# Altium footprint library Package_DFN_QFN.PcbLib: 735 footprints (part 36 of 46)
Each footprint in its own frame and in the unit in brackets; x right, y up, seen from the top. Pads: shape width x height; smd on the part's side, far side on the other; paste and mask are expansions set on the pad; w line width, h text height; cw(c..) or ccw(c..) is an arc to the next point about the centre after c.
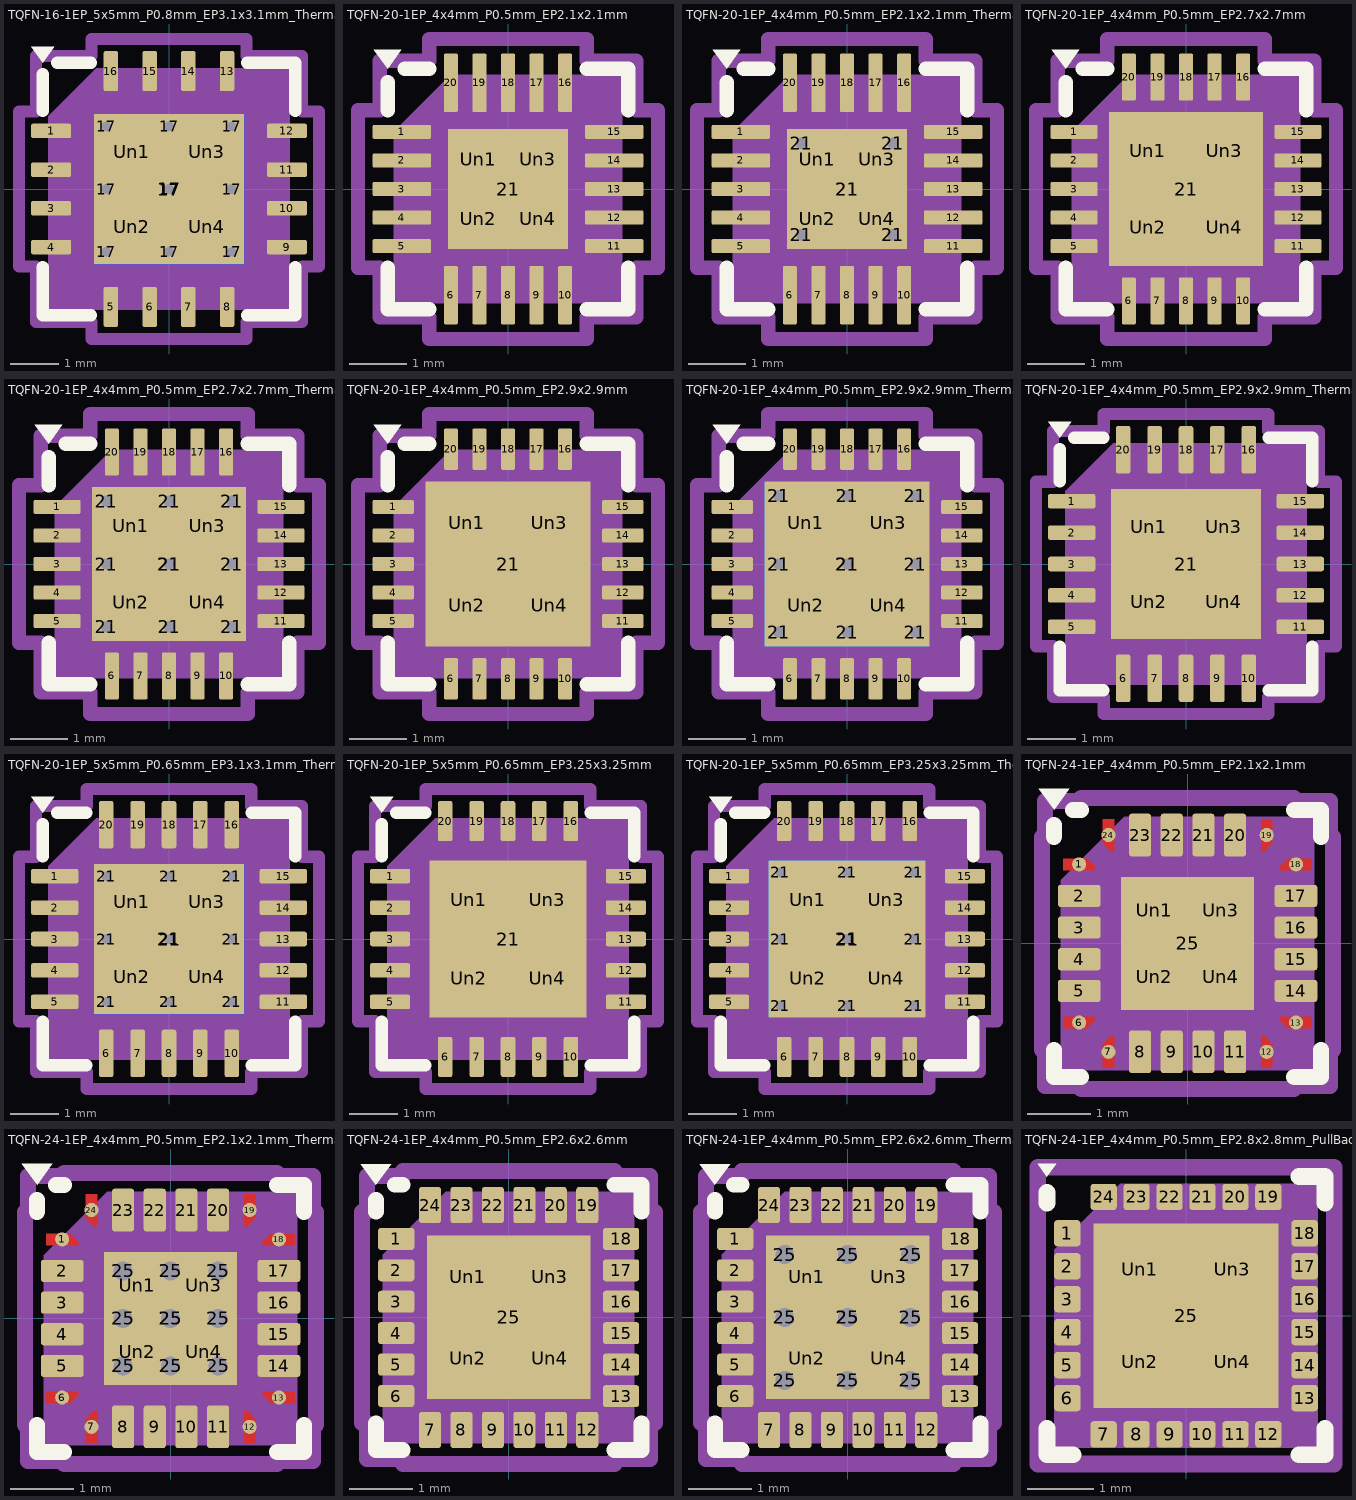
[diagram p35: the footprints below, top view; thin cyan lines are the x and y axes]

## TQFN-16-1EP_5x5mm_P0.8mm_EP3.1x3.1mm_ThermalVias [mm] "TQFN-16-1EP_5x5mm_P0.8mm_EP3.1x3.1mm_ThermalVias"
pads (31):
  rrect25% 0.825x0.3 smd: 1(-2.438,1.2) 2(-2.438,0.4) 3(-2.438,-0.4) 4(-2.438,-1.2) 9(2.438,-1.2) 10(2.438,-0.4) 11(2.438,0.4) 12(2.438,1.2)
  rrect25% 0.3x0.825 smd: 5(-1.2,-2.438) 6(-0.4,-2.438) 7(0.4,-2.438) 8(1.2,-2.438) 13(1.2,2.438) 14(0.4,2.438) 15(-0.4,2.438) 16(-1.2,2.438)
  round 0.5 hole 0.2: 17(-1.3,-1.3) 17(-1.3,0) 17(-1.3,1.3) 17(0,-1.3) 17(0,0) 17(0,1.3) 17(1.3,-1.3) 17(1.3,0) 17(1.3,1.3)
  rect 3.1x3.1 smd: 17(0,0)
  rect 3.1x3.1 smd far side: 17(0,0)
  rrect19% 1.34x1.34 on Top Paste: Un1(-0.775,0.775) Un2(-0.775,-0.775) Un3(0.775,0.775) Un4(0.775,-0.775)
F.SilkS:
  region: -2.61,2.61 -2.85,2.94 -2.37,2.94
  lines w0.254: -2.61,-1.61 -2.61,-2.61 -1.61,-2.61 ; -2.61,1.61 -2.61,2.37 ; -2.31,2.61 -1.61,2.61 ; 1.61,-2.61 2.61,-2.61 2.61,-1.61 ; 1.61,2.61 2.61,2.61 2.61,1.61
Top Component Center:
  lines w0.127: -0.127,0 0.127,0 -0.127,0 ; 0,-0.127 0,0.127 0,-0.127
Top Assembly:
  region: 2.5,-2.5 -2.5,-2.5 -2.5,1.5 -1.5,2.5 2.5,2.5
Top Courtyard:
  lines w0.254: -3.1,-1.6 -2.75,-1.6 -2.75,-2.75 -1.6,-2.75 -1.6,-3.1 1.6,-3.1 1.6,-2.75 2.75,-2.75 2.75,-1.6 3.1,-1.6 3.1,1.6 2.75,1.6 2.75,2.75 1.6,2.75 1.6,3.1 -1.6,3.1 -1.6,2.75 -2.75,2.75 -2.75,1.6 -3.1,1.6 -3.1,-1.6
Top Designator:
  text ".Designator" at -3.43,-0.344 h1.52

## TQFN-20-1EP_4x4mm_P0.5mm_EP2.1x2.1mm [mm] "TQFN-20-1EP_4x4mm_P0.5mm_EP2.1x2.1mm"
pads (25):
  rrect25% 1.025x0.25 smd: 1(-1.863,1) 2(-1.863,0.5) 3(-1.863,0) 4(-1.863,-0.5) 5(-1.863,-1) 11(1.863,-1) 12(1.863,-0.5) 13(1.863,0) 14(1.863,0.5) 15(1.863,1)
  rrect25% 0.25x1.025 smd: 6(-1,-1.863) 7(-0.5,-1.863) 8(0,-1.863) 9(0.5,-1.863) 10(1,-1.863) 16(1,1.863) 17(0.5,1.863) 18(0,1.863) 19(-0.5,1.863) 20(-1,1.863)
  rect 2.1x2.1 smd: 21(0,0)
  rrect25% 0.85x0.85 on Top Paste: Un1(-0.525,0.525) Un2(-0.525,-0.525) Un3(0.525,0.525) Un4(0.525,-0.525)
F.SilkS:
  region: -2.11,2.11 -2.35,2.44 -1.87,2.44
  lines w0.254: -2.11,-1.385 -2.11,-2.11 -1.385,-2.11 ; -2.11,1.385 -2.11,1.87 ; -1.81,2.11 -1.385,2.11 ; 1.385,-2.11 2.11,-2.11 2.11,-1.385 ; 1.385,2.11 2.11,2.11 2.11,1.385
Top Component Center:
  lines w0.127: -0.127,0 0.127,0 -0.127,0 ; 0,-0.127 0,0.127 0,-0.127
Top Assembly:
  region: 2,-2 -2,-2 -2,1 -1,2 2,2
Top Courtyard:
  lines w0.254: -2.63,-1.38 -2.25,-1.38 -2.25,-2.25 -1.38,-2.25 -1.38,-2.63 1.38,-2.63 1.38,-2.25 2.25,-2.25 2.25,-1.38 2.63,-1.38 2.63,1.38 2.25,1.38 2.25,2.25 1.38,2.25 1.38,2.63 -1.38,2.63 -1.38,2.25 -2.25,2.25 -2.25,1.38 -2.63,1.38 -2.63,-1.38
Top Designator:
  text ".Designator" at -3.43,-0.344 h1.52
3D body "TQFN-20-1EP_4x4mm_P0.5mm_EP2.7x2.7mm.step": height 0.8, standoff 0, extent -2,-2 2,2

## TQFN-20-1EP_4x4mm_P0.5mm_EP2.1x2.1mm_ThermalVias [mm] "TQFN-20-1EP_4x4mm_P0.5mm_EP2.1x2.1mm_ThermalVias"
pads (30):
  rrect25% 1.025x0.25 smd: 1(-1.863,1) 2(-1.863,0.5) 3(-1.863,0) 4(-1.863,-0.5) 5(-1.863,-1) 11(1.863,-1) 12(1.863,-0.5) 13(1.863,0) 14(1.863,0.5) 15(1.863,1)
  rrect25% 0.25x1.025 smd: 6(-1,-1.863) 7(-0.5,-1.863) 8(0,-1.863) 9(0.5,-1.863) 10(1,-1.863) 16(1,1.863) 17(0.5,1.863) 18(0,1.863) 19(-0.5,1.863) 20(-1,1.863)
  round 0.5 hole 0.2: 21(-0.8,-0.8) 21(-0.8,0.8) 21(0.8,-0.8) 21(0.8,0.8)
  rect 2.1x2.1 smd: 21(0,0)
  rect 2.1x2.1 smd far side: 21(0,0)
  rrect25% 0.91x0.91 on Top Paste: Un1(-0.525,0.525) Un2(-0.525,-0.525) Un3(0.525,0.525) Un4(0.525,-0.525)
F.SilkS:
  region: -2.11,2.11 -2.35,2.44 -1.87,2.44
  lines w0.254: -2.11,-1.385 -2.11,-2.11 -1.385,-2.11 ; -2.11,1.385 -2.11,1.87 ; -1.81,2.11 -1.385,2.11 ; 1.385,-2.11 2.11,-2.11 2.11,-1.385 ; 1.385,2.11 2.11,2.11 2.11,1.385
Top Component Center:
  lines w0.127: -0.127,0 0.127,0 -0.127,0 ; 0,-0.127 0,0.127 0,-0.127
Top Assembly:
  region: 2,-2 -2,-2 -2,1 -1,2 2,2
Top Courtyard:
  lines w0.254: -2.63,-1.38 -2.63,1.38 -2.25,1.38 -2.25,2.25 -1.38,2.25 -1.38,2.63 1.38,2.63 1.38,2.25 2.25,2.25 2.25,1.38 2.63,1.38 2.63,-1.38 2.25,-1.38 2.25,-2.25 1.38,-2.25 1.38,-2.63 -1.38,-2.63 -1.38,-2.25 -2.25,-2.25 -2.25,-1.38 -2.63,-1.38
Top Designator:
  text ".Designator" at -3.43,-0.344 h1.52
3D body "TQFN-20-1EP_4x4mm_P0.5mm_EP2.7x2.7mm.step": height 0.8, standoff 0, extent -2,-2 2,2

## TQFN-20-1EP_4x4mm_P0.5mm_EP2.7x2.7mm [mm] "TQFN-20-1EP_4x4mm_P0.5mm_EP2.7x2.7mm"
pads (25):
  rrect25% 0.825x0.25 smd: 1(-1.963,1) 2(-1.963,0.5) 3(-1.963,0) 4(-1.963,-0.5) 5(-1.963,-1) 11(1.963,-1) 12(1.963,-0.5) 13(1.963,0) 14(1.963,0.5) 15(1.963,1)
  rrect25% 0.25x0.825 smd: 6(-1,-1.963) 7(-0.5,-1.963) 8(0,-1.963) 9(0.5,-1.963) 10(1,-1.963) 16(1,1.963) 17(0.5,1.963) 18(0,1.963) 19(-0.5,1.963) 20(-1,1.963)
  rect 2.7x2.7 smd: 21(0,0)
  rrect23% 1.09x1.09 on Top Paste: Un1(-0.675,0.675) Un2(-0.675,-0.675) Un3(0.675,0.675) Un4(0.675,-0.675)
F.SilkS:
  region: -2.11,2.11 -2.35,2.44 -1.87,2.44
  lines w0.254: -2.11,-1.385 -2.11,-2.11 -1.385,-2.11 ; -2.11,1.385 -2.11,1.87 ; -1.81,2.11 -1.385,2.11 ; 1.385,-2.11 2.11,-2.11 2.11,-1.385 ; 1.385,2.11 2.11,2.11 2.11,1.385
Top Component Center:
  lines w0.127: -0.127,0 0.127,0 -0.127,0 ; 0,-0.127 0,0.127 0,-0.127
Top Assembly:
  region: 2,-2 -2,-2 -2,1 -1,2 2,2
Top Courtyard:
  lines w0.254: -2.63,-1.38 -2.63,1.38 -2.25,1.38 -2.25,2.25 -1.38,2.25 -1.38,2.63 1.38,2.63 1.38,2.25 2.25,2.25 2.25,1.38 2.63,1.38 2.63,-1.38 2.25,-1.38 2.25,-2.25 1.38,-2.25 1.38,-2.63 -1.38,-2.63 -1.38,-2.25 -2.25,-2.25 -2.25,-1.38 -2.63,-1.38
Top Designator:
  text ".Designator" at -3.43,-0.344 h1.52
3D body "TQFN-20-1EP_4x4mm_P0.5mm_EP2.7x2.7mm.step": height 0.8, standoff 0, extent -2,-2 2,2

## TQFN-20-1EP_4x4mm_P0.5mm_EP2.7x2.7mm_ThermalVias [mm] "TQFN-20-1EP_4x4mm_P0.5mm_EP2.7x2.7mm_ThermalVias"
pads (35):
  rrect25% 0.825x0.25 smd: 1(-1.963,1) 2(-1.963,0.5) 3(-1.963,0) 4(-1.963,-0.5) 5(-1.963,-1) 11(1.963,-1) 12(1.963,-0.5) 13(1.963,0) 14(1.963,0.5) 15(1.963,1)
  rrect25% 0.25x0.825 smd: 6(-1,-1.963) 7(-0.5,-1.963) 8(0,-1.963) 9(0.5,-1.963) 10(1,-1.963) 16(1,1.963) 17(0.5,1.963) 18(0,1.963) 19(-0.5,1.963) 20(-1,1.963)
  round 0.5 hole 0.2: 21(-1.1,-1.1) 21(-1.1,0) 21(-1.1,1.1) 21(0,-1.1) 21(0,0) 21(0,1.1) 21(1.1,-1.1) 21(1.1,0) 21(1.1,1.1)
  rect 2.7x2.7 smd: 21(0,0)
  rect 2.7x2.7 smd far side: 21(0,0)
  rrect21% 1.17x1.17 on Top Paste: Un1(-0.675,0.675) Un2(-0.675,-0.675) Un3(0.675,0.675) Un4(0.675,-0.675)
F.SilkS:
  region: -2.11,2.11 -2.35,2.44 -1.87,2.44
  lines w0.254: -2.11,-1.385 -2.11,-2.11 -1.385,-2.11 ; -2.11,1.385 -2.11,1.87 ; -1.81,2.11 -1.385,2.11 ; 1.385,-2.11 2.11,-2.11 2.11,-1.385 ; 1.385,2.11 2.11,2.11 2.11,1.385
Top Component Center:
  lines w0.127: -0.127,0 0.127,0 -0.127,0 ; 0,-0.127 0,0.127 0,-0.127
Top Assembly:
  region: 2,-2 -2,-2 -2,1 -1,2 2,2
Top Courtyard:
  lines w0.254: -2.63,-1.38 -2.25,-1.38 -2.25,-2.25 -1.38,-2.25 -1.38,-2.63 1.38,-2.63 1.38,-2.25 2.25,-2.25 2.25,-1.38 2.63,-1.38 2.63,1.38 2.25,1.38 2.25,2.25 1.38,2.25 1.38,2.63 -1.38,2.63 -1.38,2.25 -2.25,2.25 -2.25,1.38 -2.63,1.38 -2.63,-1.38
Top Designator:
  text ".Designator" at -3.43,-0.344 h1.52
3D body "TQFN-20-1EP_4x4mm_P0.5mm_EP2.7x2.7mm.step": height 0.8, standoff 0, extent -2,-2 2,2

## TQFN-20-1EP_4x4mm_P0.5mm_EP2.9x2.9mm [mm] "TQFN-20-1EP_4x4mm_P0.5mm_EP2.9x2.9mm"
pads (25):
  rrect25% 0.725x0.25 smd: 1(-2.013,1) 2(-2.013,0.5) 3(-2.013,0) 4(-2.013,-0.5) 5(-2.013,-1) 11(2.013,-1) 12(2.013,-0.5) 13(2.013,0) 14(2.013,0.5) 15(2.013,1)
  rrect25% 0.25x0.725 smd: 6(-1,-2.013) 7(-0.5,-2.013) 8(0,-2.013) 9(0.5,-2.013) 10(1,-2.013) 16(1,2.013) 17(0.5,2.013) 18(0,2.013) 19(-0.5,2.013) 20(-1,2.013)
  rect 2.9x2.9 smd: 21(0,0)
  rrect21% 1.17x1.17 on Top Paste: Un1(-0.725,0.725) Un2(-0.725,-0.725) Un3(0.725,0.725) Un4(0.725,-0.725)
F.SilkS:
  region: -2.11,2.11 -2.35,2.44 -1.87,2.44
  lines w0.254: -2.11,-1.385 -2.11,-2.11 -1.385,-2.11 ; -2.11,1.385 -2.11,1.87 ; -1.81,2.11 -1.385,2.11 ; 1.385,-2.11 2.11,-2.11 2.11,-1.385 ; 1.385,2.11 2.11,2.11 2.11,1.385
Top Component Center:
  lines w0.127: -0.127,0 0.127,0 -0.127,0 ; 0,-0.127 0,0.127 0,-0.127
Top Assembly:
  region: 2,-2 -2,-2 -2,1 -1,2 2,2
Top Courtyard:
  lines w0.254: -2.63,-1.38 -2.63,1.38 -2.25,1.38 -2.25,2.25 -1.38,2.25 -1.38,2.63 1.38,2.63 1.38,2.25 2.25,2.25 2.25,1.38 2.63,1.38 2.63,-1.38 2.25,-1.38 2.25,-2.25 1.38,-2.25 1.38,-2.63 -1.38,-2.63 -1.38,-2.25 -2.25,-2.25 -2.25,-1.38 -2.63,-1.38
Top Designator:
  text ".Designator" at -3.43,-0.344 h1.52
3D body "TQFN-20-1EP_4x4mm_P0.5mm_EP2.7x2.7mm.step": height 0.8, standoff 0, extent -2,-2 2,2

## TQFN-20-1EP_4x4mm_P0.5mm_EP2.9x2.9mm_ThermalVias [mm] "TQFN-20-1EP_4x4mm_P0.5mm_EP2.9x2.9mm_ThermalVias"
pads (35):
  rrect25% 0.725x0.25 smd: 1(-2.013,1) 2(-2.013,0.5) 3(-2.013,0) 4(-2.013,-0.5) 5(-2.013,-1) 11(2.013,-1) 12(2.013,-0.5) 13(2.013,0) 14(2.013,0.5) 15(2.013,1)
  rrect25% 0.25x0.725 smd: 6(-1,-2.013) 7(-0.5,-2.013) 8(0,-2.013) 9(0.5,-2.013) 10(1,-2.013) 16(1,2.013) 17(0.5,2.013) 18(0,2.013) 19(-0.5,2.013) 20(-1,2.013)
  round 0.5 hole 0.2: 21(-1.2,-1.2) 21(-1.2,0) 21(-1.2,1.2) 21(0,-1.2) 21(0,0) 21(0,1.2) 21(1.2,-1.2) 21(1.2,0) 21(1.2,1.2)
  rect 2.9x2.9 smd: 21(0,0)
  rect 2.9x2.9 smd far side: 21(0,0)
  rrect20% 1.26x1.26 on Top Paste: Un1(-0.725,0.725) Un2(-0.725,-0.725) Un3(0.725,0.725) Un4(0.725,-0.725)
F.SilkS:
  region: -2.11,2.11 -2.35,2.44 -1.87,2.44
  lines w0.254: -2.11,-1.385 -2.11,-2.11 -1.385,-2.11 ; -2.11,1.385 -2.11,1.87 ; -1.81,2.11 -1.385,2.11 ; 1.385,-2.11 2.11,-2.11 2.11,-1.385 ; 1.385,2.11 2.11,2.11 2.11,1.385
Top Component Center:
  lines w0.127: -0.127,0 0.127,0 -0.127,0 ; 0,-0.127 0,0.127 0,-0.127
Top Assembly:
  region: 2,-2 -2,-2 -2,1 -1,2 2,2
Top Courtyard:
  lines w0.254: -2.63,-1.38 -2.25,-1.38 -2.25,-2.25 -1.38,-2.25 -1.38,-2.63 1.38,-2.63 1.38,-2.25 2.25,-2.25 2.25,-1.38 2.63,-1.38 2.63,1.38 2.25,1.38 2.25,2.25 1.38,2.25 1.38,2.63 -1.38,2.63 -1.38,2.25 -2.25,2.25 -2.25,1.38 -2.63,1.38 -2.63,-1.38
Top Designator:
  text ".Designator" at -3.43,-0.344 h1.52
3D body "TQFN-20-1EP_4x4mm_P0.5mm_EP2.7x2.7mm.step": height 0.8, standoff 0, extent -2,-2 2,2

## TQFN-20-1EP_4x4mm_P0.5mm_EP2.9x2.9mm_ThermalVias - duplicate [mm] "TQFN-20-1EP_4x4mm_P0.5mm_EP2.9x2.9mm_ThermalVias"
pads (25):
  rrect25% 0.975x0.3 smd: 1(-2.362,1.3) 2(-2.362,0.65) 3(-2.362,0) 4(-2.362,-0.65) 5(-2.362,-1.3) 11(2.362,-1.3) 12(2.362,-0.65) 13(2.362,0) 14(2.362,0.65) 15(2.362,1.3)
  rrect25% 0.3x0.975 smd: 6(-1.3,-2.362) 7(-0.65,-2.362) 8(0,-2.362) 9(0.65,-2.362) 10(1.3,-2.362) 16(1.3,2.362) 17(0.65,2.362) 18(0,2.362) 19(-0.65,2.362) 20(-1.3,2.362)
  rect 3.1x3.1 smd: 21(0,0)
  rrect20% 1.25x1.25 on Top Paste: Un1(-0.775,0.775) Un2(-0.775,-0.775) Un3(0.775,0.775) Un4(0.775,-0.775)
F.SilkS:
  region: -2.61,2.61 -2.85,2.94 -2.37,2.94
  lines w0.254: -2.61,-1.71 -2.61,-2.61 -1.71,-2.61 ; -2.61,1.71 -2.61,2.37 ; -2.31,2.61 -1.71,2.61 ; 1.71,-2.61 2.61,-2.61 2.61,-1.71 ; 1.71,2.61 2.61,2.61 2.61,1.71
Top Component Center:
  lines w0.127: -0.127,0 0.127,0 -0.127,0 ; 0,-0.127 0,0.127 0,-0.127
Top Assembly:
  region: 2.5,-2.5 -2.5,-2.5 -2.5,1.5 -1.5,2.5 2.5,2.5
Top Courtyard:
  lines w0.254: -3.1,-1.7 -3.1,1.7 -2.75,1.7 -2.75,2.75 -1.7,2.75 -1.7,3.1 1.7,3.1 1.7,2.75 2.75,2.75 2.75,1.7 3.1,1.7 3.1,-1.7 2.75,-1.7 2.75,-2.75 1.7,-2.75 1.7,-3.1 -1.7,-3.1 -1.7,-2.75 -2.75,-2.75 -2.75,-1.7 -3.1,-1.7
Top Designator:
  text ".Designator" at -3.43,-0.344 h1.52
3D body "TQFN-20-1EP_4x4mm_P0.5mm_EP2.7x2.7mm.step": height 0.8, standoff 0, extent -2,-2 2,2

## TQFN-20-1EP_5x5mm_P0.65mm_EP3.1x3.1mm_ThermalVias [mm] "TQFN-20-1EP_5x5mm_P0.65mm_EP3.1x3.1mm_ThermalVias"
pads (35):
  rrect25% 0.975x0.3 smd: 1(-2.362,1.3) 2(-2.362,0.65) 3(-2.362,0) 4(-2.362,-0.65) 5(-2.362,-1.3) 11(2.362,-1.3) 12(2.362,-0.65) 13(2.362,0) 14(2.362,0.65) 15(2.362,1.3)
  rrect25% 0.3x0.975 smd: 6(-1.3,-2.362) 7(-0.65,-2.362) 8(0,-2.362) 9(0.65,-2.362) 10(1.3,-2.362) 16(1.3,2.362) 17(0.65,2.362) 18(0,2.362) 19(-0.65,2.362) 20(-1.3,2.362)
  round 0.5 hole 0.2: 21(-1.3,-1.3) 21(-1.3,0) 21(-1.3,1.3) 21(0,-1.3) 21(0,0) 21(0,1.3) 21(1.3,-1.3) 21(1.3,0) 21(1.3,1.3)
  rect 3.1x3.1 smd: 21(0,0)
  rect 3.1x3.1 smd far side: 21(0,0)
  rrect19% 1.34x1.34 on Top Paste: Un1(-0.775,0.775) Un2(-0.775,-0.775) Un3(0.775,0.775) Un4(0.775,-0.775)
F.SilkS:
  region: -2.61,2.61 -2.85,2.94 -2.37,2.94
  lines w0.254: -2.61,-1.71 -2.61,-2.61 -1.71,-2.61 ; -2.61,1.71 -2.61,2.37 ; -2.31,2.61 -1.71,2.61 ; 1.71,-2.61 2.61,-2.61 2.61,-1.71 ; 1.71,2.61 2.61,2.61 2.61,1.71
Top Component Center:
  lines w0.127: -0.127,0 0.127,0 -0.127,0 ; 0,-0.127 0,0.127 0,-0.127
Top Assembly:
  region: 2.5,-2.5 -2.5,-2.5 -2.5,1.5 -1.5,2.5 2.5,2.5
Top Courtyard:
  lines w0.254: -3.1,-1.7 -3.1,1.7 -2.75,1.7 -2.75,2.75 -1.7,2.75 -1.7,3.1 1.7,3.1 1.7,2.75 2.75,2.75 2.75,1.7 3.1,1.7 3.1,-1.7 2.75,-1.7 2.75,-2.75 1.7,-2.75 1.7,-3.1 -1.7,-3.1 -1.7,-2.75 -2.75,-2.75 -2.75,-1.7 -3.1,-1.7
Top Designator:
  text ".Designator" at -3.43,-0.344 h1.52
3D body "TQFN-20-1EP_5x5mm_P0.65mm_EP3.1x3.1mm.step": height 0.77, standoff 0, extent -2.5,-2.5 2.5,2.5

## TQFN-20-1EP_5x5mm_P0.65mm_EP3.25x3.25mm [mm] "TQFN-20-1EP_5x5mm_P0.65mm_EP3.25x3.25mm"
pads (25):
  rrect25% 0.825x0.3 smd: 1(-2.438,1.3) 2(-2.438,0.65) 3(-2.438,0) 4(-2.438,-0.65) 5(-2.438,-1.3) 11(2.438,-1.3) 12(2.438,-0.65) 13(2.438,0) 14(2.438,0.65) 15(2.438,1.3)
  rrect25% 0.3x0.825 smd: 6(-1.3,-2.438) 7(-0.65,-2.438) 8(0,-2.438) 9(0.65,-2.438) 10(1.3,-2.438) 16(1.3,2.438) 17(0.65,2.438) 18(0,2.438) 19(-0.65,2.438) 20(-1.3,2.438)
  rect 3.25x3.25 smd: 21(0,0)
  rrect19% 1.31x1.31 on Top Paste: Un1(-0.81,0.81) Un2(-0.81,-0.81) Un3(0.81,0.81) Un4(0.81,-0.81)
F.SilkS:
  region: -2.61,2.61 -2.85,2.94 -2.37,2.94
  lines w0.254: -2.61,-1.71 -2.61,-2.61 -1.71,-2.61 ; -2.61,1.71 -2.61,2.37 ; -2.31,2.61 -1.71,2.61 ; 1.71,-2.61 2.61,-2.61 2.61,-1.71 ; 1.71,2.61 2.61,2.61 2.61,1.71
Top Component Center:
  lines w0.127: -0.127,0 0.127,0 -0.127,0 ; 0,-0.127 0,0.127 0,-0.127
Top Assembly:
  region: 2.5,-2.5 -2.5,-2.5 -2.5,1.5 -1.5,2.5 2.5,2.5
Top Courtyard:
  lines w0.254: -3.1,-1.7 -2.75,-1.7 -2.75,-2.75 -1.7,-2.75 -1.7,-3.1 1.7,-3.1 1.7,-2.75 2.75,-2.75 2.75,-1.7 3.1,-1.7 3.1,1.7 2.75,1.7 2.75,2.75 1.7,2.75 1.7,3.1 -1.7,3.1 -1.7,2.75 -2.75,2.75 -2.75,1.7 -3.1,1.7 -3.1,-1.7
Top Designator:
  text ".Designator" at -3.43,-0.344 h1.52
3D body "TQFN-20-1EP_5x5mm_P0.65mm_EP3.1x3.1mm.step": height 0.77, standoff 0, extent -2.5,-2.5 2.5,2.5

## TQFN-20-1EP_5x5mm_P0.65mm_EP3.25x3.25mm_ThermalVias [mm] "TQFN-20-1EP_5x5mm_P0.65mm_EP3.25x3.25mm_ThermalVias"
pads (35):
  rrect25% 0.825x0.3 smd: 1(-2.438,1.3) 2(-2.438,0.65) 3(-2.438,0) 4(-2.438,-0.65) 5(-2.438,-1.3) 11(2.438,-1.3) 12(2.438,-0.65) 13(2.438,0) 14(2.438,0.65) 15(2.438,1.3)
  rrect25% 0.3x0.825 smd: 6(-1.3,-2.438) 7(-0.65,-2.438) 8(0,-2.438) 9(0.65,-2.438) 10(1.3,-2.438) 16(1.3,2.438) 17(0.65,2.438) 18(0,2.438) 19(-0.65,2.438) 20(-1.3,2.438)
  round 0.5 hole 0.2: 21(-1.375,-1.375) 21(-1.375,0) 21(-1.375,1.375) 21(0,-1.375) 21(0,0) 21(0,1.375) 21(1.375,-1.375) 21(1.375,0) 21(1.375,1.375)
  rect 3.25x3.25 smd: 21(0,0)
  rect 3.25x3.25 smd far side: 21(0,0)
  rrect18% 1.41x1.41 on Top Paste: Un1(-0.81,0.81) Un2(-0.81,-0.81) Un3(0.81,0.81) Un4(0.81,-0.81)
F.SilkS:
  region: -2.61,2.61 -2.85,2.94 -2.37,2.94
  lines w0.254: -2.61,-1.71 -2.61,-2.61 -1.71,-2.61 ; -2.61,1.71 -2.61,2.37 ; -2.31,2.61 -1.71,2.61 ; 1.71,-2.61 2.61,-2.61 2.61,-1.71 ; 1.71,2.61 2.61,2.61 2.61,1.71
Top Component Center:
  lines w0.127: -0.127,0 0.127,0 -0.127,0 ; 0,-0.127 0,0.127 0,-0.127
Top Assembly:
  region: 2.5,-2.5 -2.5,-2.5 -2.5,1.5 -1.5,2.5 2.5,2.5
Top Courtyard:
  lines w0.254: -3.1,-1.7 -2.75,-1.7 -2.75,-2.75 -1.7,-2.75 -1.7,-3.1 1.7,-3.1 1.7,-2.75 2.75,-2.75 2.75,-1.7 3.1,-1.7 3.1,1.7 2.75,1.7 2.75,2.75 1.7,2.75 1.7,3.1 -1.7,3.1 -1.7,2.75 -2.75,2.75 -2.75,1.7 -3.1,1.7 -3.1,-1.7
Top Designator:
  text ".Designator" at -3.43,-0.344 h1.52
3D body "TQFN-20-1EP_5x5mm_P0.65mm_EP3.1x3.1mm.step": height 0.77, standoff 0, extent -2.5,-2.5 2.5,2.5

## TQFN-24-1EP_4x4mm_P0.5mm_EP2.1x2.1mm [mm] "TQFN-24-1EP_4x4mm_P0.5mm_EP2.1x2.1mm"
pads (29):
  round 0.223 smd: 1(-1.713,1.25) 6(-1.713,-1.25) 7(-1.25,-1.713) 12(1.25,-1.713) 13(1.713,-1.25) 18(1.713,1.25) 19(1.25,1.713) 24(-1.25,1.713)
  rrect25% 0.675x0.35 smd: 2(-1.713,0.75) 3(-1.713,0.25) 4(-1.713,-0.25) 5(-1.713,-0.75) 14(1.713,-0.75) 15(1.713,-0.25) 16(1.713,0.25) 17(1.713,0.75)
  rrect25% 0.35x0.675 smd: 8(-0.75,-1.713) 9(-0.25,-1.713) 10(0.25,-1.713) 11(0.75,-1.713) 20(0.75,1.713) 21(0.25,1.713) 22(-0.25,1.713) 23(-0.75,1.713)
  rect 2.1x2.1 smd: 25(0,0)
  rrect25% 0.85x0.85 on Top Paste: Un1(-0.525,0.525) Un2(-0.525,-0.525) Un3(0.525,0.525) Un4(0.525,-0.525)
F.Cu:
  region: -1.16,1.46 -1.21,1.46 -1.34,1.59 -1.34,1.965 -1.16,1.965
  region: 1.34,1.59 1.21,1.46 1.16,1.46 1.16,1.965 1.34,1.965
  region: 1.965,1.16 1.46,1.16 1.46,1.21 1.59,1.34 1.965,1.34
  region: 1.965,-1.34 1.59,-1.34 1.46,-1.21 1.46,-1.16 1.965,-1.16
  region: 1.34,-1.59 1.34,-1.965 1.16,-1.965 1.16,-1.46 1.21,-1.46
  region: -1.16,-1.965 -1.34,-1.965 -1.34,-1.59 -1.21,-1.46 -1.16,-1.46
  region: -1.46,-1.21 -1.59,-1.34 -1.965,-1.34 -1.965,-1.16 -1.46,-1.16
  region: -1.46,1.21 -1.46,1.16 -1.965,1.16 -1.965,1.34 -1.59,1.34
F.SilkS:
  region: -2.11,2.11 -2.35,2.44 -1.87,2.44
  lines w0.254: -2.11,-1.685 -2.11,-2.11 -1.685,-2.11 ; -2.11,1.685 -2.11,1.87 ; -1.81,2.11 -1.685,2.11 ; 1.685,-2.11 2.11,-2.11 2.11,-1.685 ; 1.685,2.11 2.11,2.11 2.11,1.685
F.Paste:
  region: -1.16,1.46 -1.21,1.46 -1.34,1.59 -1.34,1.965 -1.16,1.965
  region: 1.34,1.59 1.21,1.46 1.16,1.46 1.16,1.965 1.34,1.965
  region: 1.965,1.16 1.46,1.16 1.46,1.21 1.59,1.34 1.965,1.34
  region: 1.965,-1.34 1.59,-1.34 1.46,-1.21 1.46,-1.16 1.965,-1.16
  region: 1.34,-1.59 1.34,-1.965 1.16,-1.965 1.16,-1.46 1.21,-1.46
  region: -1.16,-1.965 -1.34,-1.965 -1.34,-1.59 -1.21,-1.46 -1.16,-1.46
  region: -1.46,-1.21 -1.59,-1.34 -1.965,-1.34 -1.965,-1.16 -1.46,-1.16
  region: -1.46,1.21 -1.46,1.16 -1.965,1.16 -1.965,1.34 -1.59,1.34
F.Mask:
  region: -1.16,1.46 -1.21,1.46 -1.34,1.59 -1.34,1.965 -1.16,1.965
  region: 1.34,1.59 1.21,1.46 1.16,1.46 1.16,1.965 1.34,1.965
  region: 1.965,1.16 1.46,1.16 1.46,1.21 1.59,1.34 1.965,1.34
  region: 1.965,-1.34 1.59,-1.34 1.46,-1.21 1.46,-1.16 1.965,-1.16
  region: 1.34,-1.59 1.34,-1.965 1.16,-1.965 1.16,-1.46 1.21,-1.46
  region: -1.16,-1.965 -1.34,-1.965 -1.34,-1.59 -1.21,-1.46 -1.16,-1.46
  region: -1.46,-1.21 -1.59,-1.34 -1.965,-1.34 -1.965,-1.16 -1.46,-1.16
  region: -1.46,1.21 -1.46,1.16 -1.965,1.16 -1.965,1.34 -1.59,1.34
Top Component Center:
  lines w0.127: -0.127,0 0.127,0 -0.127,0 ; 0,-0.127 0,0.127 0,-0.127
Top Assembly:
  region: 2,-2 -2,-2 -2,1 -1,2 2,2
Top Courtyard:
  lines w0.254: -2.3,-1.68 -2.25,-1.68 -2.25,-2.25 -1.68,-2.25 -1.68,-2.3 1.68,-2.3 1.68,-2.25 2.25,-2.25 2.25,-1.68 2.3,-1.68 2.3,1.68 2.25,1.68 2.25,2.25 1.68,2.25 1.68,2.3 -1.68,2.3 -1.68,2.25 -2.25,2.25 -2.25,1.68 -2.3,1.68 -2.3,-1.68
Top Designator:
  text ".Designator" at -3.43,-0.344 h1.52

## TQFN-24-1EP_4x4mm_P0.5mm_EP2.1x2.1mm_ThermalVias [mm] "TQFN-24-1EP_4x4mm_P0.5mm_EP2.1x2.1mm_ThermalVias"
pads (39):
  round 0.223 smd: 1(-1.713,1.25) 6(-1.713,-1.25) 7(-1.25,-1.713) 12(1.25,-1.713) 13(1.713,-1.25) 18(1.713,1.25) 19(1.25,1.713) 24(-1.25,1.713)
  rrect25% 0.675x0.35 smd: 2(-1.713,0.75) 3(-1.713,0.25) 4(-1.713,-0.25) 5(-1.713,-0.75) 14(1.713,-0.75) 15(1.713,-0.25) 16(1.713,0.25) 17(1.713,0.75)
  rrect25% 0.35x0.675 smd: 8(-0.75,-1.713) 9(-0.25,-1.713) 10(0.25,-1.713) 11(0.75,-1.713) 20(0.75,1.713) 21(0.25,1.713) 22(-0.25,1.713) 23(-0.75,1.713)
  round 0.6 hole 0.3: 25(-0.75,-0.75) 25(-0.75,0) 25(-0.75,0.75) 25(0,-0.75) 25(0,0) 25(0,0.75) 25(0.75,-0.75) 25(0.75,0) 25(0.75,0.75)
  rect 2.1x2.1 smd: 25(0,0)
  rect 2.1x2.1 smd far side: 25(0,0)
  rrect25% 0.85x0.85 on Top Paste: Un1(-0.525,0.525) Un2(-0.525,-0.525) Un3(0.525,0.525) Un4(0.525,-0.525)
F.Cu:
  region: -1.16,1.46 -1.21,1.46 -1.34,1.59 -1.34,1.965 -1.16,1.965
  region: 1.34,1.59 1.21,1.46 1.16,1.46 1.16,1.965 1.34,1.965
  region: 1.965,1.16 1.46,1.16 1.46,1.21 1.59,1.34 1.965,1.34
  region: 1.965,-1.34 1.59,-1.34 1.46,-1.21 1.46,-1.16 1.965,-1.16
  region: 1.34,-1.59 1.34,-1.965 1.16,-1.965 1.16,-1.46 1.21,-1.46
  region: -1.16,-1.965 -1.34,-1.965 -1.34,-1.59 -1.21,-1.46 -1.16,-1.46
  region: -1.46,-1.21 -1.59,-1.34 -1.965,-1.34 -1.965,-1.16 -1.46,-1.16
  region: -1.46,1.21 -1.46,1.16 -1.965,1.16 -1.965,1.34 -1.59,1.34
F.SilkS:
  region: -2.11,2.11 -2.35,2.44 -1.87,2.44
  lines w0.254: -2.11,-1.685 -2.11,-2.11 -1.685,-2.11 ; -2.11,1.685 -2.11,1.87 ; -1.81,2.11 -1.685,2.11 ; 1.685,-2.11 2.11,-2.11 2.11,-1.685 ; 1.685,2.11 2.11,2.11 2.11,1.685
F.Paste:
  region: -1.16,1.46 -1.21,1.46 -1.34,1.59 -1.34,1.965 -1.16,1.965
  region: 1.34,1.59 1.21,1.46 1.16,1.46 1.16,1.965 1.34,1.965
  region: 1.965,1.16 1.46,1.16 1.46,1.21 1.59,1.34 1.965,1.34
  region: 1.965,-1.34 1.59,-1.34 1.46,-1.21 1.46,-1.16 1.965,-1.16
  region: 1.34,-1.59 1.34,-1.965 1.16,-1.965 1.16,-1.46 1.21,-1.46
  region: -1.16,-1.965 -1.34,-1.965 -1.34,-1.59 -1.21,-1.46 -1.16,-1.46
  region: -1.46,-1.21 -1.59,-1.34 -1.965,-1.34 -1.965,-1.16 -1.46,-1.16
  region: -1.46,1.21 -1.46,1.16 -1.965,1.16 -1.965,1.34 -1.59,1.34
F.Mask:
  region: -1.16,1.46 -1.21,1.46 -1.34,1.59 -1.34,1.965 -1.16,1.965
  region: 1.34,1.59 1.21,1.46 1.16,1.46 1.16,1.965 1.34,1.965
  region: 1.965,1.16 1.46,1.16 1.46,1.21 1.59,1.34 1.965,1.34
  region: 1.965,-1.34 1.59,-1.34 1.46,-1.21 1.46,-1.16 1.965,-1.16
  region: 1.34,-1.59 1.34,-1.965 1.16,-1.965 1.16,-1.46 1.21,-1.46
  region: -1.16,-1.965 -1.34,-1.965 -1.34,-1.59 -1.21,-1.46 -1.16,-1.46
  region: -1.46,-1.21 -1.59,-1.34 -1.965,-1.34 -1.965,-1.16 -1.46,-1.16
  region: -1.46,1.21 -1.46,1.16 -1.965,1.16 -1.965,1.34 -1.59,1.34
Top Component Center:
  lines w0.127: -0.127,0 0.127,0 -0.127,0 ; 0,-0.127 0,0.127 0,-0.127
Top Assembly:
  region: 2,-2 -2,-2 -2,1 -1,2 2,2
Top Courtyard:
  lines w0.254: -2.3,-1.68 -2.25,-1.68 -2.25,-2.25 -1.68,-2.25 -1.68,-2.3 1.68,-2.3 1.68,-2.25 2.25,-2.25 2.25,-1.68 2.3,-1.68 2.3,1.68 2.25,1.68 2.25,2.25 1.68,2.25 1.68,2.3 -1.68,2.3 -1.68,2.25 -2.25,2.25 -2.25,1.68 -2.3,1.68 -2.3,-1.68
Top Designator:
  text ".Designator" at -3.43,-0.344 h1.52

## TQFN-24-1EP_4x4mm_P0.5mm_EP2.6x2.6mm [mm] "TQFN-24-1EP_4x4mm_P0.5mm_EP2.6x2.6mm"
pads (29):
  rrect25% 0.575x0.35 smd: 1(-1.787,1.25) 2(-1.787,0.75) 3(-1.787,0.25) 4(-1.787,-0.25) 5(-1.787,-0.75) 6(-1.787,-1.25) 13(1.787,-1.25) 14(1.787,-0.75) 15(1.787,-0.25) 16(1.787,0.25) 17(1.787,0.75) 18(1.787,1.25)
  rrect25% 0.35x0.575 smd: 7(-1.25,-1.787) 8(-0.75,-1.787) 9(-0.25,-1.787) 10(0.25,-1.787) 11(0.75,-1.787) 12(1.25,-1.787) 19(1.25,1.787) 20(0.75,1.787) 21(0.25,1.787) 22(-0.25,1.787) 23(-0.75,1.787) 24(-1.25,1.787)
  rect 2.6x2.6 smd: 25(0,0)
  rrect24% 1.05x1.05 on Top Paste: Un1(-0.65,0.65) Un2(-0.65,-0.65) Un3(0.65,0.65) Un4(0.65,-0.65)
F.SilkS:
  region: -2.11,2.11 -2.35,2.44 -1.87,2.44
  lines w0.254: -2.11,-1.685 -2.11,-2.11 -1.685,-2.11 ; -2.11,1.685 -2.11,1.87 ; -1.81,2.11 -1.685,2.11 ; 1.685,-2.11 2.11,-2.11 2.11,-1.685 ; 1.685,2.11 2.11,2.11 2.11,1.685
Top Component Center:
  lines w0.127: -0.127,0 0.127,0 -0.127,0 ; 0,-0.127 0,0.127 0,-0.127
Top Assembly:
  region: 2,-2 -2,-2 -2,1 -1,2 2,2
Top Courtyard:
  lines w0.254: -2.33,-1.68 -2.25,-1.68 -2.25,-2.25 -1.68,-2.25 -1.68,-2.33 1.68,-2.33 1.68,-2.25 2.25,-2.25 2.25,-1.68 2.33,-1.68 2.33,1.68 2.25,1.68 2.25,2.25 1.68,2.25 1.68,2.33 -1.68,2.33 -1.68,2.25 -2.25,2.25 -2.25,1.68 -2.33,1.68 -2.33,-1.68
Top Designator:
  text ".Designator" at -3.43,-0.344 h1.52

## TQFN-24-1EP_4x4mm_P0.5mm_EP2.6x2.6mm_ThermalVias [mm] "TQFN-24-1EP_4x4mm_P0.5mm_EP2.6x2.6mm_ThermalVias"
pads (39):
  rrect25% 0.575x0.35 smd: 1(-1.787,1.25) 2(-1.787,0.75) 3(-1.787,0.25) 4(-1.787,-0.25) 5(-1.787,-0.75) 6(-1.787,-1.25) 13(1.787,-1.25) 14(1.787,-0.75) 15(1.787,-0.25) 16(1.787,0.25) 17(1.787,0.75) 18(1.787,1.25)
  rrect25% 0.35x0.575 smd: 7(-1.25,-1.787) 8(-0.75,-1.787) 9(-0.25,-1.787) 10(0.25,-1.787) 11(0.75,-1.787) 12(1.25,-1.787) 19(1.25,1.787) 20(0.75,1.787) 21(0.25,1.787) 22(-0.25,1.787) 23(-0.75,1.787) 24(-1.25,1.787)
  round 0.6 hole 0.3: 25(-1,-1) 25(-1,0) 25(-1,1) 25(0,-1) 25(0,0) 25(0,1) 25(1,-1) 25(1,0) 25(1,1)
  rect 2.6x2.6 smd: 25(0,0)
  rect 2.6x2.6 smd far side: 25(0,0)
  rrect24% 1.05x1.05 on Top Paste: Un1(-0.65,0.65) Un2(-0.65,-0.65) Un3(0.65,0.65) Un4(0.65,-0.65)
F.SilkS:
  region: -2.11,2.11 -2.35,2.44 -1.87,2.44
  lines w0.254: -2.11,-1.685 -2.11,-2.11 -1.685,-2.11 ; -2.11,1.685 -2.11,1.87 ; -1.81,2.11 -1.685,2.11 ; 1.685,-2.11 2.11,-2.11 2.11,-1.685 ; 1.685,2.11 2.11,2.11 2.11,1.685
Top Component Center:
  lines w0.127: -0.127,0 0.127,0 -0.127,0 ; 0,-0.127 0,0.127 0,-0.127
Top Assembly:
  region: 2,-2 -2,-2 -2,1 -1,2 2,2
Top Courtyard:
  lines w0.254: -2.33,-1.68 -2.25,-1.68 -2.25,-2.25 -1.68,-2.25 -1.68,-2.33 1.68,-2.33 1.68,-2.25 2.25,-2.25 2.25,-1.68 2.33,-1.68 2.33,1.68 2.25,1.68 2.25,2.25 1.68,2.25 1.68,2.33 -1.68,2.33 -1.68,2.25 -2.25,2.25 -2.25,1.68 -2.33,1.68 -2.33,-1.68
Top Designator:
  text ".Designator" at -3.43,-0.344 h1.52

## TQFN-24-1EP_4x4mm_P0.5mm_EP2.8x2.8mm_PullBack [mm] "TQFN-24-1EP_4x4mm_P0.5mm_EP2.8x2.8mm_PullBack"
pads (29):
  rrect25% 0.4x0.4 smd: 1(-1.8,1.25) 2(-1.8,0.75) 3(-1.8,0.25) 4(-1.8,-0.25) 5(-1.8,-0.75) 6(-1.8,-1.25) 7(-1.25,-1.8) 8(-0.75,-1.8) 9(-0.25,-1.8) 10(0.25,-1.8) 11(0.75,-1.8) 12(1.25,-1.8) 13(1.8,-1.25) 14(1.8,-0.75) 15(1.8,-0.25) 16(1.8,0.25) 17(1.8,0.75) 18(1.8,1.25) 19(1.25,1.8) 20(0.75,1.8) 21(0.25,1.8) 22(-0.25,1.8) 23(-0.75,1.8) 24(-1.25,1.8)
  rect 2.8x2.8 smd: 25(0,0)
  rrect22% 1.13x1.13 on Top Paste: Un1(-0.7,0.7) Un2(-0.7,-0.7) Un3(0.7,0.7) Un4(0.7,-0.7)
F.SilkS:
  region: -2.11,2.11 -2.25,2.3 -1.97,2.3
  lines w0.254: -2.11,-1.71 -2.11,-2.11 -1.71,-2.11 ; -2.11,1.71 -2.11,1.87 ; 1.71,-2.11 2.11,-2.11 2.11,-1.71 ; 1.71,2.11 2.11,2.11 2.11,1.71
Top Component Center:
  lines w0.127: -0.127,0 0.127,0 -0.127,0 ; 0,-0.127 0,0.127 0,-0.127
Top Assembly:
  region: 2,-2 -2,-2 -2,1 -1,2 2,2
Top Courtyard:
  lines w0.254: -2.25,-2.25 2.25,-2.25 2.25,2.25 -2.25,2.25 -2.25,-2.25
Top Designator:
  text ".Designator" at -3.43,-0.344 h1.52